# Altium footprint library Brian_.PcbLib: 66 footprints (part 1 of 5)
Each footprint in its own frame and in the unit in brackets; x right, y up, seen from the top. Pads: shape width x height; smd on the part's side, far side on the other; paste and mask are expansions set on the pad; w line width, h text height; cw(c..) or ccw(c..) is an arc to the next point about the centre after c.
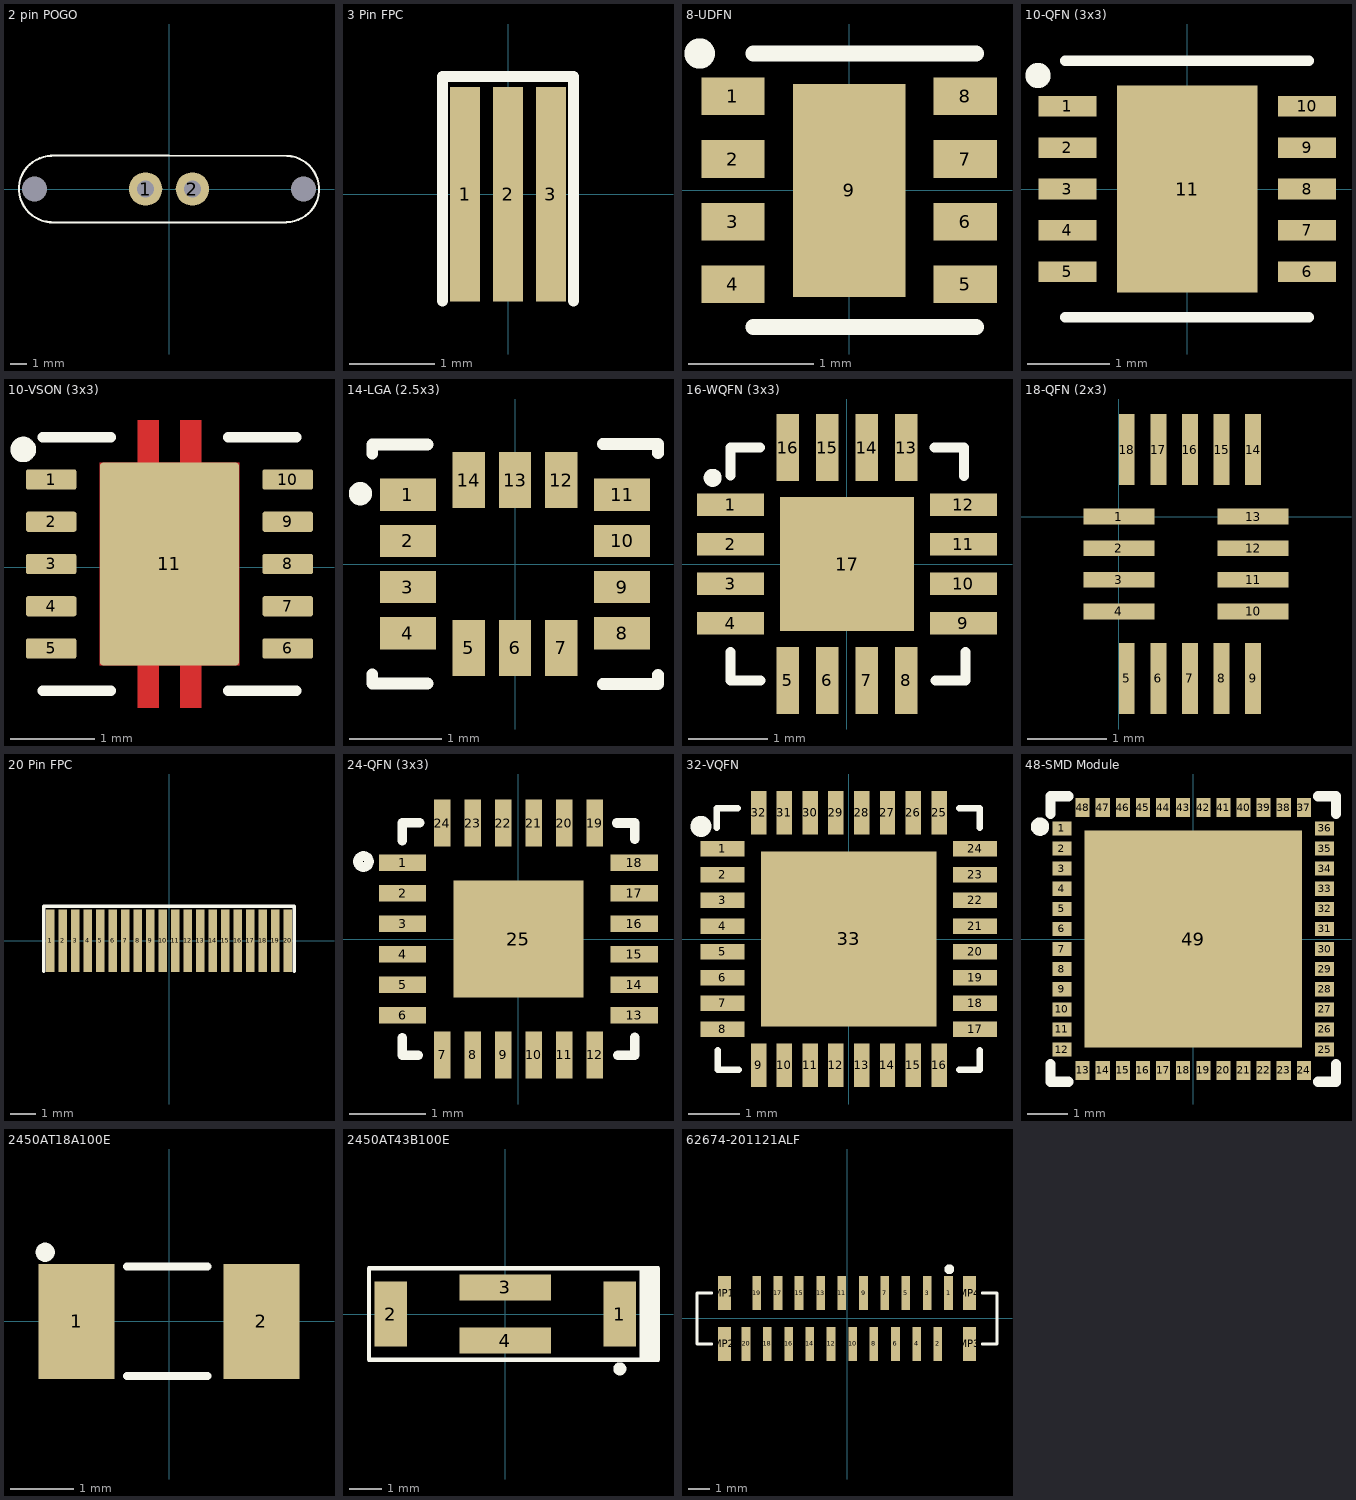
[diagram p0: the footprints below, top view; thin cyan lines are the x and y axes]

## 2 pin POGO [mm]
pads (4):
  round 2 hole 1: 1(-1.4,0) 2(1.4,0)
  round 0 hole 1.5 unplated: MH1(-8.05,0)
  oval 1x0 hole 1.5 unplated: MH2(8.05,0)
Top Overlay:
  lines w0.127: -7.137,-2 0,-2 7.01,-2 ; -7.087,2 0,2 7.163,1.981 ; -7.049,-1.983 cw(c-6.985,0) -7.017,1.984 ; 7.017,-1.984 ccw(c6.985,0) 7.049,1.983
3D body "2-pin_pogo_connector.stp": height 5, standoff -1.75, extent -6.6,-2 6.6,2

## 3 Pin FPC [mm]
pads (3):
  rect 0.35x2.5 smd: 1(-0.5,0) 2(0,0) 3(0.5,0)
Top Overlay:
  lines w0.127: -0.762,-1.245 -0.762,1.372 0.762,1.372 0.762,-1.245

## 3 pin POGO [mm]

## 8-UDFN [mm]
pads (9):
  rect 0.505x0.3 smd: 1(-0.928,0.75) 2(-0.928,0.25) 3(-0.928,-0.25) 4(-0.928,-0.75) 5(0.928,-0.75) 6(0.928,-0.25) 7(0.928,0.25) 8(0.928,0.75)
  rect 0.9x1.7 smd: 9(0,0)
Top Overlay:
  circle w0.2: c-1.194,1.092 r0.021
  lines w0.127: -0.766,-1.092 1.012,-1.092 ; -0.766,1.092 1.012,1.092
3D body "UDFN8_2X2_MCH.step": height 0.61, standoff 0, extent -1.029,-1.029 1.029,1.029

## 10-QFN (3x3) [mm]
pads (11):
  rect 0.7x0.25 smd: 1(-1.45,1) 2(-1.45,0.5) 3(-1.45,0) 4(-1.45,-0.5) 5(-1.45,-1) 6(1.45,-1) 7(1.45,-0.5) 8(1.45,0) 9(1.45,0.5) 10(1.45,1)
  rect 1.7x2.5 smd: 11(0,0)
Top Overlay:
  circle w0.254: c-1.803,1.372 r0.025
  lines w0.127: -1.473,-1.549 1.473,-1.549 ; -1.473,1.549 1.473,1.549
3D body "User Library-10m1 QFN50P300X300X100-10_270X175_IPC-7351B.step": height 1, standoff -0.05, extent -1.51,-1.5 1.51,1.5

## 10-VSON (3x3) [mm]
pads (11):
  rrect25% 0.6x0.24 smd mask+0: 1(-7.112,1.041) 2(-7.112,0.541) 3(-7.112,0.041) 4(-7.112,-0.459) 5(-7.112,-0.959) 6(-4.312,-0.959) 7(-4.312,-0.459) 8(-4.312,0.041) 9(-4.312,0.541) 10(-4.312,1.041)
  rrect5% 1.65x2.4 smd paste-2 mask+0: 11(-5.712,0.041)
Top Layer:
  region: -5.337,1.241 -4.887,1.241 -4.887,-1.159 -5.337,-1.159 -5.337,-1.659 -5.587,-1.659 -5.587,-1.159 -5.837,-1.159 -5.837,-1.659 -6.087,-1.659 -6.087,-1.159 -6.537,-1.159 -6.537,1.241 -6.087,1.241 -6.087,1.741 -5.837,1.741 -5.837,1.241 -5.587,1.241 -5.587,1.741 -5.337,1.741
Top Overlay:
  circle w0.2: c-7.442,1.397 r0.051
  lines w0.127: -7.212,-1.459 -6.407,-1.459 ; -7.212,1.541 -6.407,1.541 ; -5.017,-1.459 -4.212,-1.459 ; -5.017,1.541 -4.212,1.541
Top Paste:
  region: -4.962,0.141 -6.462,0.141 -6.462,1.201 -4.962,1.201
  region: -4.962,-1.119 -6.462,-1.119 -6.462,-0.059 -4.962,-0.059
  region: -5.337,1.401 -5.587,1.401 -5.587,1.741 -5.337,1.741
  region: -5.837,1.401 -6.087,1.401 -6.087,1.741 -5.837,1.741
  region: -5.337,-1.659 -5.587,-1.659 -5.587,-1.319 -5.337,-1.319
  region: -5.837,-1.659 -6.087,-1.659 -6.087,-1.319 -5.837,-1.319
Top Solder:
  region: -5.267,1.311 -4.817,1.311 -4.817,-1.229 -5.267,-1.229 -5.267,-1.729 -5.657,-1.729 -5.657,-1.229 -5.767,-1.229 -5.767,-1.729 -6.157,-1.729 -6.157,-1.229 -6.607,-1.229 -6.607,1.311 -6.157,1.311 -6.157,1.811 -5.767,1.811 -5.767,1.311 -5.657,1.311 -5.657,1.811 -5.267,1.811
  region: -3.942,0.851 -4.682,0.851 -4.682,1.231 -3.942,1.231
  region: -3.942,0.351 -4.682,0.351 -4.682,0.731 -3.942,0.731
  region: -3.942,-0.149 -4.682,-0.149 -4.682,0.231 -3.942,0.231
  region: -3.942,-0.649 -4.682,-0.649 -4.682,-0.269 -3.942,-0.269
  region: -3.942,-1.149 -4.682,-1.149 -4.682,-0.769 -3.942,-0.769
  region: -6.742,-1.149 -7.482,-1.149 -7.482,-0.769 -6.742,-0.769
  region: -6.742,-0.649 -7.482,-0.649 -7.482,-0.269 -6.742,-0.269
  region: -6.742,-0.149 -7.482,-0.149 -7.482,0.231 -6.742,0.231
  region: -6.742,0.351 -7.482,0.351 -7.482,0.731 -6.742,0.731
  region: -6.742,0.851 -7.482,0.851 -7.482,1.231 -6.742,1.231
3D body "step_temp.STEP": height 1, standoff 0, extent -7.212,-1.459 -4.212,1.541

## 14-LGA (2.5x3) [mm]
pads (14):
  rect 0.61x0.35 smd: 1(-1.16,0.75) 2(-1.16,0.25) 3(-1.16,-0.25) 4(-1.16,-0.75) 8(1.16,-0.75) 9(1.16,-0.25) 10(1.16,0.25) 11(1.16,0.75)
  rect 0.35x0.61 smd: 5(-0.5,-0.91) 6(0,-0.91) 7(0.5,-0.91) 12(0.5,0.91) 13(0,0.91) 14(-0.5,0.91)
Top Overlay:
  circle w0.2: c-1.676,0.762 r0.025
  lines w0.127: -1.548,-1.195 -1.548,-1.295 -0.948,-1.295 ; -1.548,1.195 -1.548,1.295 -0.948,1.295 ; 0.95,-1.3 1.55,-1.3 1.55,-1.2 ; 0.95,1.3 1.55,1.3 1.55,1.2
3D body "User Library-LGA-14 2_5x3.step": height 0.85, standoff -0.01, extent -1.5,-1.25 1.5,1.25

## 16-WQFN (3x3) [mm] "Charger IC Lithium Ion/Polymer 16-WQFN (3x3)"
pads (17):
  rect 0.85x0.28 smd: 1(-1.475,0.75) 2(-1.475,0.25) 3(-1.475,-0.25) 4(-1.475,-0.75) 9(1.475,-0.75) 10(1.475,-0.25) 11(1.475,0.25) 12(1.475,0.75)
  rect 0.28x0.85 smd: 5(-0.75,-1.475) 6(-0.25,-1.475) 7(0.25,-1.475) 8(0.75,-1.475) 13(0.75,1.475) 14(0.25,1.475) 15(-0.25,1.475) 16(-0.75,1.475)
  rect 1.7x1.7 smd: 17(0,0)
Top Overlay:
  circle w0.127: c-1.702,1.092 r0.051
  lines w0.127: -1.476,1.119 -1.476,1.478 -1.099,1.478 ; -1.473,-1.116 -1.473,-1.475 -1.096,-1.475 ; 1.107,1.473 1.484,1.473 1.484,1.114 ; 1.122,-1.475 1.499,-1.475 1.499,-1.116
3D body "User Library-S-PWQFN-N16.STEP": height 0.8, standoff 0, extent -1.51,-1.51 1.51,1.51

## 18-QFN (2x3) [mm] "IC BATT CHG LI-ION 2CELL 18QFN"
pads (18):
  rect 0.9x0.2 smd: 1(0,0) 2(0,-0.4) 3(0,-0.8) 4(0,-1.2) 10(1.7,-1.2) 11(1.7,-0.8) 12(1.7,-0.4) 13(1.7,0)
  rect 0.2x0.9 smd: 5(0.1,-2.05) 6(0.5,-2.05) 7(0.9,-2.05) 8(1.3,-2.05) 9(1.7,-2.05) 14(1.7,0.85) 15(1.3,0.85) 16(0.9,0.85) 17(0.5,0.85) 18(0.1,0.85)

## 20 Pin FPC [mm]
pads (20):
  rect 0.35x2.5 smd: 1(-4.75,0) 2(-4.25,0) 3(-3.75,0) 4(-3.25,0) 5(-2.75,0) 6(-2.25,0) 7(-1.75,0) 8(-1.25,0) 9(-0.75,0) 10(-0.25,0) 11(0.25,0) 12(0.75,0) 13(1.25,0) 14(1.75,0) 15(2.25,0) 16(2.75,0) 17(3.25,0) 18(3.75,0) 19(4.25,0) 20(4.75,0)
Top Overlay:
  lines w0.127: -5.012,-1.245 -5.012,1.372 -0.516,1.372 5.012,1.372 5.012,-1.245

## 24-QFN (3x3) [mm]
pads (25):
  rect 0.62x0.22 smd: 1(-1.52,1) 2(-1.52,0.6) 3(-1.52,0.2) 4(-1.52,-0.2) 5(-1.52,-0.6) 6(-1.52,-1) 13(1.52,-1) 14(1.52,-0.6) 15(1.52,-0.2) 16(1.52,0.2) 17(1.52,0.6) 18(1.52,1)
  rect 0.22x0.62 smd: 7(-1,-1.52) 8(-0.6,-1.52) 9(-0.2,-1.52) 10(0.2,-1.52) 11(0.6,-1.52) 12(1,-1.52) 19(1,1.52) 20(0.6,1.52) 21(0.2,1.52) 22(-0.2,1.52) 23(-0.6,1.52) 24(-1,1.52)
  rect 1.7x1.54 smd: 25(0,0)
Top Overlay:
  circle w0.127: c-2.032,1.016 r0.072
  lines w0.127: -1.522,-1.293 -1.522,-1.524 -1.315,-1.524 ; -1.522,1.288 -1.522,1.524 -1.293,1.524 ; 1.29,1.522 1.524,1.522 1.524,1.31 ; 1.304,-1.524 1.524,-1.524 1.524,-1.291
Top Paste:
  region: 0.08,-0.08 0.69,-0.08 0.69,-0.611 0.08,-0.611
  region: -0.691,-0.08 -0.08,-0.08 -0.08,-0.611 -0.691,-0.611
  region: 0.08,0.61 0.69,0.61 0.69,0.08 0.08,0.08
  region: -0.691,0.61 -0.08,0.61 -0.08,0.08 -0.691,0.08
3D body "ICM-20948--3DModel-STEP-56544.STEP": height 1.03, standoff -0.02, extent -1.5,-1.501 1.5,1.499

## 32-VQFN [mm] "IC MCU 8BIT 32KB FLASH 32VFQFN"
pads (33):
  rect 0.85x0.3 smd: 1(-2.45,1.75) 2(-2.45,1.25) 3(-2.45,0.75) 4(-2.45,0.25) 5(-2.45,-0.25) 6(-2.45,-0.75) 7(-2.45,-1.25) 8(-2.45,-1.75) 17(2.45,-1.75) 18(2.45,-1.25) 19(2.45,-0.75) 20(2.45,-0.25) 21(2.45,0.25) 22(2.45,0.75) 23(2.45,1.25) 24(2.45,1.75)
  rect 0.3x0.85 smd: 9(-1.75,-2.45) 10(-1.25,-2.45) 11(-0.75,-2.45) 12(-0.25,-2.45) 13(0.25,-2.45) 14(0.75,-2.45) 15(1.25,-2.45) 16(1.75,-2.45) 25(1.75,2.45) 26(1.25,2.45) 27(0.75,2.45) 28(0.25,2.45) 29(-0.25,2.45) 30(-0.75,2.45) 31(-1.25,2.45) 32(-1.75,2.45)
  rect 3.4x3.4 smd: 33(0,0)
Top Overlay:
  circle w0.254: c-2.87,2.184 r0.076
  lines w0.127: -2.561,2.159 -2.561,2.54 -2.159,2.54 ; -2.54,-2.159 -2.54,-2.54 -2.138,-2.54 ; 2.138,-2.54 2.54,-2.54 2.54,-2.159 ; 2.138,2.54 2.54,2.54 2.54,2.159
3D body "32M1-A_MCH.step": height 1.4, standoff 0, extent -2.55,-2.55 2.55,2.55

## 48-SMD Module [mm]
pads (49):
  rect 0.47x0.35 smd: 1(-3.265,2.75) 2(-3.265,2.25) 3(-3.265,1.75) 4(-3.265,1.25) 5(-3.265,0.75) 6(-3.265,0.25) 7(-3.265,-0.25) 8(-3.265,-0.75) 9(-3.265,-1.25) 10(-3.265,-1.75) 11(-3.265,-2.25) 12(-3.265,-2.75) 25(3.265,-2.75) 26(3.265,-2.25) 27(3.265,-1.75) 28(3.265,-1.25) 29(3.265,-0.75) 30(3.265,-0.25) 31(3.265,0.25) 32(3.265,0.75) 33(3.265,1.25) 34(3.265,1.75) 35(3.265,2.25) 36(3.265,2.75)
  rect 0.35x0.47 smd: 13(-2.75,-3.265) 14(-2.25,-3.265) 15(-1.75,-3.265) 16(-1.25,-3.265) 17(-0.75,-3.265) 18(-0.25,-3.265) 19(0.25,-3.265) 20(0.75,-3.265) 21(1.25,-3.265) 22(1.75,-3.265) 23(2.25,-3.265) 24(2.75,-3.265) 37(2.75,3.265) 38(2.25,3.265) 39(1.75,3.265) 40(1.25,3.265) 41(0.75,3.265) 42(0.25,3.265) 43(-0.25,3.265) 44(-0.75,3.265) 45(-1.25,3.265) 46(-1.75,3.265) 47(-2.25,3.265) 48(-2.75,3.265)
  rect 5.4x5.4 smd paste-4: 49(0,0)
Top Overlay:
  circle w0.254: c-3.81,2.794 r0.1
  lines w0.254: -3.55,-3.11 -3.55,-3.55 -3.11,-3.55 ; -3.55,3.11 -3.55,3.55 -3.11,3.55 ; 3.11,-3.55 3.55,-3.55 3.55,-3.11 ; 3.11,3.55 3.55,3.55 3.55,3.11
3D body "ESP32-PICO-D4--3DModel-STEP-56544.STEP": height 1.04, standoff 0, extent -3.5,-3.5 3.5,3.5

## 2450AT18A100E [mm] "RF ANT 2.4GHZ CHIP SOLDER SMD"
pads (2):
  rect 1.2x1.82 smd: 1(-1.46,0) 2(1.46,0)
Top Overlay:
  circle w0.2: c-1.956,1.092 r0.051
  lines w0.127: -0.66,-0.864 0.61,-0.864 ; -0.66,0.864 0.61,0.864
3D body "User Library-Antenne 3216.STEP": height 1.3, standoff 0, extent -1.6,-0.8 1.6,0.8

## 2450AT43B100E [mm] "RF ANT 2.4GHZ CHIP SOLDER SMD"
pads (4):
  rect 1x2 smd: 1(3.5,0) 2(-3.5,0)
  rect 2.8x0.8 smd: 3(0,0.815) 4(0,-0.815)
Top Overlay:
  circle w0.2: c3.505,-1.676 r0.1
  region: 4.615,1.397 4.615,-1.397 4.115,-1.397 4.115,1.397
  lines w0.127: -4.166,-1.397 -4.166,1.397 4.674,1.397 4.674,-1.397 -4.166,-1.397
3D body "2450AT43B100E--3DModel-STEP-56544.STEP": height 2.03, standoff -0.07, extent -3.424,-1.009 3.576,0.991

## 62674-201121ALF [mil]
pads (24):
  rect 16x63 smd: 1(187.5,47) 2(167.5,-47) 3(148.5,47) 4(128.5,-47) 5(108.5,47) 6(89.5,-47) 7(69.5,47) 8(49.5,-47) 9(30.5,47) 10(10.5,-47) 11(-9.5,47) 12(-29.5,-47) 13(-48.5,47) 14(-68.5,-47) 15(-88.5,47) 16(-107.5,-47) 17(-127.5,47) 18(-147.5,-47) 19(-166.5,47) 20(-186.5,-47)
  rect 24x63 smd: MP1(-226.5,47) MP2(-226.5,-47) MP3(226.5,-47) MP4(226.5,47)
Top Overlay:
  circle w10: c189,91 r4
  lines w5: -250,-47 -277,-47 -277,47 -250,47 ; 250,-47 277,-47 277,47 250,47
3D body "62674201121alf.stp": height 161.61, standoff 0.2, extent -285.43,-68.89 285.44,64.97